# Altium footprint library 2019-09-14_17-18-04.PcbLib: 3 footprints
Each footprint in its own frame and in the unit in brackets; x right, y up, seen from the top. Pads: shape width x height; smd on the part's side, far side on the other; paste and mask are expansions set on the pad; w line width, h text height; cw(c..) or ccw(c..) is an arc to the next point about the centre after c.
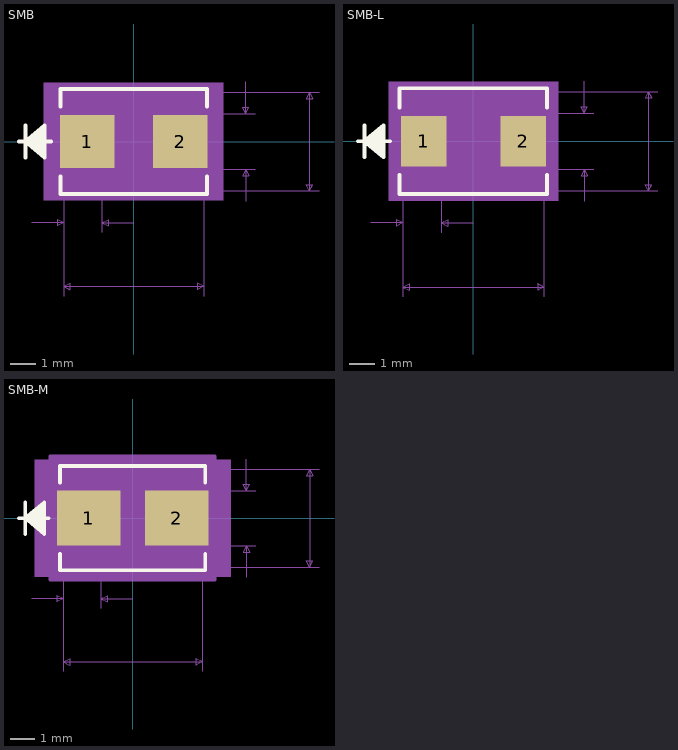
[diagram p0: the footprints below, top view; thin cyan lines are the x and y axes]

## SMB [mm]
pads (2):
  rect 2.18x2.108 smd paste+0 mask+0: 1(-1.857,0) 2(1.857,0)
Top Overlay:
  lines w0.152: -4.573,0 -3.303,0 ; -4.319,-0.635 -4.319,0.635 ; -3.557,-0.508 -4.319,0 ; -3.557,-0.381 -4.319,0 ; -3.557,-0.254 -4.319,0 ; -3.557,-0.127 -4.319,0 ; -3.557,0.127 -4.319,0 ; -3.557,0.254 -4.319,0 ; -3.557,0.381 -4.319,0 ; -3.557,0.508 -4.319,0 ; -2.922,-1.387 -2.922,-2.097 2.922,-2.097 2.922,-1.387 ; -2.922,1.387 -2.922,2.097 2.922,2.097 2.922,1.387 ; -4.319,0 -3.557,0.635 -3.557,-0.635 -4.319,0
Mechanical 5:
  region: 3.582,-2.351 -3.582,-2.351 -3.582,2.351 3.582,2.351
Mechanical 7:
  lines w0.025: -4.065,-3.24 -2.795,-3.24 ; -2.795,-6.161 -2.795,0 -2.795,-3.621 ; -1.275,-3.621 -1.275,0 ; -0.005,-3.24 -1.275,-3.24 ; 2.795,-6.161 2.795,0 ; 3.201,-1.97 7.392,-1.97 ; 3.201,-1.105 4.852,-1.105 ; 3.201,1.105 4.852,1.105 ; 3.201,1.97 7.392,1.97 ; 4.471,-2.375 4.471,-1.105 ; 4.471,2.375 4.471,1.105 ; -2.795,-5.78 2.795,-5.78 ; -2.795,-5.78 -2.541,-5.653 -2.541,-5.907 -2.795,-5.78 ; -2.795,-3.24 -3.049,-3.113 -3.049,-3.367 -2.795,-3.24 ; -1.275,-3.24 -1.021,-3.113 -1.021,-3.367 -1.275,-3.24 ; 2.795,-5.78 2.541,-5.653 2.541,-5.907 2.795,-5.78 ; 4.471,-1.105 4.344,-1.359 4.598,-1.359 4.471,-1.105 ; 4.471,1.105 4.344,1.359 4.598,1.359 4.471,1.105 ; 7.011,-1.97 7.011,1.97 ; 7.011,-1.97 6.884,-1.716 7.138,-1.716 7.011,-1.97 ; 7.011,1.97 6.884,1.716 7.138,1.716 7.011,1.97
  text "Default Padstyle: RX85p84Y83p01D0T" at -10.795,-8.955 h1.27
  text "Alt 1 Padstyle: OX60Y90D30P" at -8.572,-10.86 h1.27
  text "Alt 2 Padstyle: OX90Y60D30P" at -8.572,-12.765 h1.27
  text "0.087in/2.21mm" at 4.979,-0.318 h0.64
  text "0.155in/3.94mm" at 7.519,-0.318 h0.64
  text "0.22in/5.59mm" at -2.064,-6.923 h0.64
  text "0.06in/1.52mm" at -4.099,-4.383 h0.64
Mechanical 13:
  lines w0.025: -4.573,0 -3.303,0 ; -4.319,-0.635 -4.319,0.635 ; -3.557,-0.508 -4.319,0 ; -3.557,-0.381 -4.319,0 ; -3.557,-0.254 -4.319,0 ; -3.557,-0.127 -4.319,0 ; -3.557,0.127 -4.319,0 ; -3.557,0.254 -4.319,0 ; -3.557,0.381 -4.319,0 ; -3.557,0.508 -4.319,0 ; -4.319,0 -3.557,0.635 -3.557,-0.635 -4.319,0 ; -2.795,-1.97 2.795,-1.97 2.795,1.97 -2.795,1.97 -2.795,-1.97
Mechanical 15:
  region: -3.049,-1.359 -3.201,-1.359 -3.201,1.359 -3.049,1.359 -3.049,2.224 3.049,2.224 3.049,1.359 3.201,1.359 3.201,-1.359 3.049,-1.359 3.049,-2.224 -3.049,-2.224
  lines w0.152: -3.201,-1.359 -3.201,1.359 -3.049,1.359 -3.049,2.224 3.049,2.224 3.049,1.359 3.201,1.359 3.201,-1.359 3.049,-1.359 3.049,-2.224 -3.049,-2.224 -3.049,-1.359 -3.201,-1.359
3D body: height 0.25, standoff 0, extent 0,0 0.254,0.254

## SMB-L [mm]
pads (2):
  rect 1.799x2.007 smd paste+0 mask+0: 1(-1.971,0) 2(1.971,0)
Top Overlay:
  lines w0.152: -4.573,0 -3.303,0 ; -4.319,-0.635 -4.319,0.635 ; -3.557,-0.508 -4.319,0 ; -3.557,-0.381 -4.319,0 ; -3.557,-0.254 -4.319,0 ; -3.557,-0.127 -4.319,0 ; -3.557,0.127 -4.319,0 ; -3.557,0.254 -4.319,0 ; -3.557,0.381 -4.319,0 ; -3.557,0.508 -4.319,0 ; -2.922,-1.332 -2.922,-2.097 2.922,-2.097 2.922,-1.332 ; -2.922,1.332 -2.922,2.097 2.922,2.097 2.922,1.332 ; -4.319,0 -3.557,0.635 -3.557,-0.635 -4.319,0
Mechanical 5:
  region: 3.354,-2.351 -3.354,-2.351 -3.354,2.351 3.354,2.351
Mechanical 7:
  lines w0.025: -4.065,-3.24 -2.795,-3.24 ; -2.795,-6.161 -2.795,0 -2.795,-3.621 ; -1.275,-3.621 -1.275,0 ; -0.005,-3.24 -1.275,-3.24 ; 2.795,-6.161 2.795,0 ; 3.125,-1.97 7.316,-1.97 ; 3.125,-1.105 4.776,-1.105 ; 3.125,1.105 4.776,1.105 ; 3.125,1.97 7.316,1.97 ; 4.395,-2.375 4.395,-1.105 ; 4.395,2.375 4.395,1.105 ; -2.795,-5.78 2.795,-5.78 ; -2.795,-5.78 -2.541,-5.653 -2.541,-5.907 -2.795,-5.78 ; -2.795,-3.24 -3.049,-3.113 -3.049,-3.367 -2.795,-3.24 ; -1.275,-3.24 -1.021,-3.113 -1.021,-3.367 -1.275,-3.24 ; 2.795,-5.78 2.541,-5.653 2.541,-5.907 2.795,-5.78 ; 4.395,-1.105 4.268,-1.359 4.522,-1.359 4.395,-1.105 ; 4.395,1.105 4.268,1.359 4.522,1.359 4.395,1.105 ; 6.935,-1.97 6.935,1.97 ; 6.935,-1.97 6.808,-1.716 7.062,-1.716 6.935,-1.97 ; 6.935,1.97 6.808,1.716 7.062,1.716 6.935,1.97
  text "Default Padstyle: RX70p84Y79p01D0T" at -10.795,-8.955 h1.27
  text "Alt 1 Padstyle: OX60Y90D30P" at -8.572,-10.86 h1.27
  text "Alt 2 Padstyle: OX90Y60D30P" at -8.572,-12.765 h1.27
  text "0.087in/2.21mm" at 4.903,-0.318 h0.64
  text "0.155in/3.94mm" at 7.443,-0.318 h0.64
  text "0.22in/5.59mm" at -2.064,-6.923 h0.64
  text "0.06in/1.52mm" at -4.099,-4.383 h0.64
Mechanical 13:
  lines w0.025: -4.573,0 -3.303,0 ; -4.319,-0.635 -4.319,0.635 ; -3.557,-0.508 -4.319,0 ; -3.557,-0.381 -4.319,0 ; -3.557,-0.254 -4.319,0 ; -3.557,-0.127 -4.319,0 ; -3.557,0.127 -4.319,0 ; -3.557,0.254 -4.319,0 ; -3.557,0.381 -4.319,0 ; -3.557,0.508 -4.319,0 ; -4.319,0 -3.557,0.635 -3.557,-0.635 -4.319,0 ; -2.795,-1.97 2.795,-1.97 2.795,1.97 -2.795,1.97 -2.795,-1.97
Mechanical 15:
  region: -2.897,-1.207 -2.973,-1.207 -2.973,1.207 -2.897,1.207 -2.897,2.072 2.897,2.072 2.897,1.207 2.973,1.207 2.973,-1.207 2.897,-1.207 2.897,-2.072 -2.897,-2.072
  lines w0.152: -2.973,-1.207 -2.973,1.207 -2.897,1.207 -2.897,2.072 2.897,2.072 2.897,1.207 2.973,1.207 2.973,-1.207 2.897,-1.207 2.897,-2.072 -2.897,-2.072 -2.897,-1.207 -2.973,-1.207
3D body: height 0.25, standoff 0, extent 0,0 0.254,0.254

## SMB-M [mm]
pads (2):
  rect 2.561x2.21 smd paste+0 mask+0: 1(-1.768,0) 2(1.768,0)
Top Overlay:
  lines w0.152: -4.573,0 -3.382,0 ; -4.319,-0.635 -4.319,0.635 ; -3.557,-0.508 -4.319,0 ; -3.557,-0.381 -4.319,0 ; -3.557,-0.254 -4.319,0 ; -3.557,-0.127 -4.319,0 ; -3.557,0.127 -4.319,0 ; -3.557,0.254 -4.319,0 ; -3.557,0.381 -4.319,0 ; -3.557,0.508 -4.319,0 ; -2.922,-1.438 -2.922,-2.097 2.922,-2.097 2.922,-1.438 ; -2.922,1.438 -2.922,2.097 2.922,2.097 2.922,1.438 ; -4.319,0 -3.557,0.635 -3.557,-0.635 -4.319,0
Mechanical 5:
  region: 3.938,-2.351 -3.938,-2.351 -3.938,2.351 3.938,2.351
Mechanical 7:
  lines w0.025: -4.065,-3.24 -2.795,-3.24 ; -2.795,-6.161 -2.795,0 -2.795,-3.621 ; -1.275,-3.621 -1.275,0 ; -0.005,-3.24 -1.275,-3.24 ; 2.795,-6.161 2.795,0 ; 3.303,-1.97 7.494,-1.97 ; 3.303,-1.105 4.954,-1.105 ; 3.303,1.105 4.954,1.105 ; 3.303,1.97 7.494,1.97 ; 4.573,-2.375 4.573,-1.105 ; 4.573,2.375 4.573,1.105 ; -2.795,-5.78 2.795,-5.78 ; -2.795,-5.78 -2.541,-5.653 -2.541,-5.907 -2.795,-5.78 ; -2.795,-3.24 -3.049,-3.113 -3.049,-3.367 -2.795,-3.24 ; -1.275,-3.24 -1.021,-3.113 -1.021,-3.367 -1.275,-3.24 ; 2.795,-5.78 2.541,-5.653 2.541,-5.907 2.795,-5.78 ; 4.573,-1.105 4.446,-1.359 4.7,-1.359 4.573,-1.105 ; 4.573,1.105 4.446,1.359 4.7,1.359 4.573,1.105 ; 7.113,-1.97 7.113,1.97 ; 7.113,-1.97 6.986,-1.716 7.24,-1.716 7.113,-1.97 ; 7.113,1.97 6.986,1.716 7.24,1.716 7.113,1.97
  text "Default Padstyle: RX100p84Y87p01D0T" at -11.112,-8.955 h1.27
  text "Alt 1 Padstyle: OX60Y90D30P" at -8.572,-10.86 h1.27
  text "Alt 2 Padstyle: OX90Y60D30P" at -8.572,-12.765 h1.27
  text "0.087in/2.21mm" at 5.081,-0.318 h0.64
  text "0.155in/3.94mm" at 7.621,-0.318 h0.64
  text "0.22in/5.59mm" at -2.064,-6.923 h0.64
  text "0.06in/1.52mm" at -4.099,-4.383 h0.64
Mechanical 13:
  lines w0.025: -4.573,0 -3.303,0 ; -4.319,-0.635 -4.319,0.635 ; -3.557,-0.508 -4.319,0 ; -3.557,-0.381 -4.319,0 ; -3.557,-0.254 -4.319,0 ; -3.557,-0.127 -4.319,0 ; -3.557,0.127 -4.319,0 ; -3.557,0.254 -4.319,0 ; -3.557,0.381 -4.319,0 ; -3.557,0.508 -4.319,0 ; -4.319,0 -3.557,0.635 -3.557,-0.635 -4.319,0 ; -2.795,-1.97 2.795,-1.97 2.795,1.97 -2.795,1.97 -2.795,-1.97
Mechanical 15:
  region: -3.303,-1.613 -3.557,-1.613 -3.557,1.613 -3.303,1.613 -3.303,2.478 3.303,2.478 3.303,1.613 3.557,1.613 3.557,-1.613 3.303,-1.613 3.303,-2.478 -3.303,-2.478
  lines w0.152: -3.557,-1.613 -3.557,1.613 -3.303,1.613 -3.303,2.478 3.303,2.478 3.303,1.613 3.557,1.613 3.557,-1.613 3.303,-1.613 3.303,-2.478 -3.303,-2.478 -3.303,-1.613 -3.557,-1.613
3D body: height 0.25, standoff 0, extent 0,0 0.254,0.254